# Altium footprint library FootPrintLib_12.PcbLib: 319 footprints (part 18 of 20)
Each footprint in its own frame and in the unit in brackets; x right, y up, seen from the top. Pads: shape width x height; smd on the part's side, far side on the other; paste and mask are expansions set on the pad; w line width, h text height; cw(c..) or ccw(c..) is an arc to the next point about the centre after c.
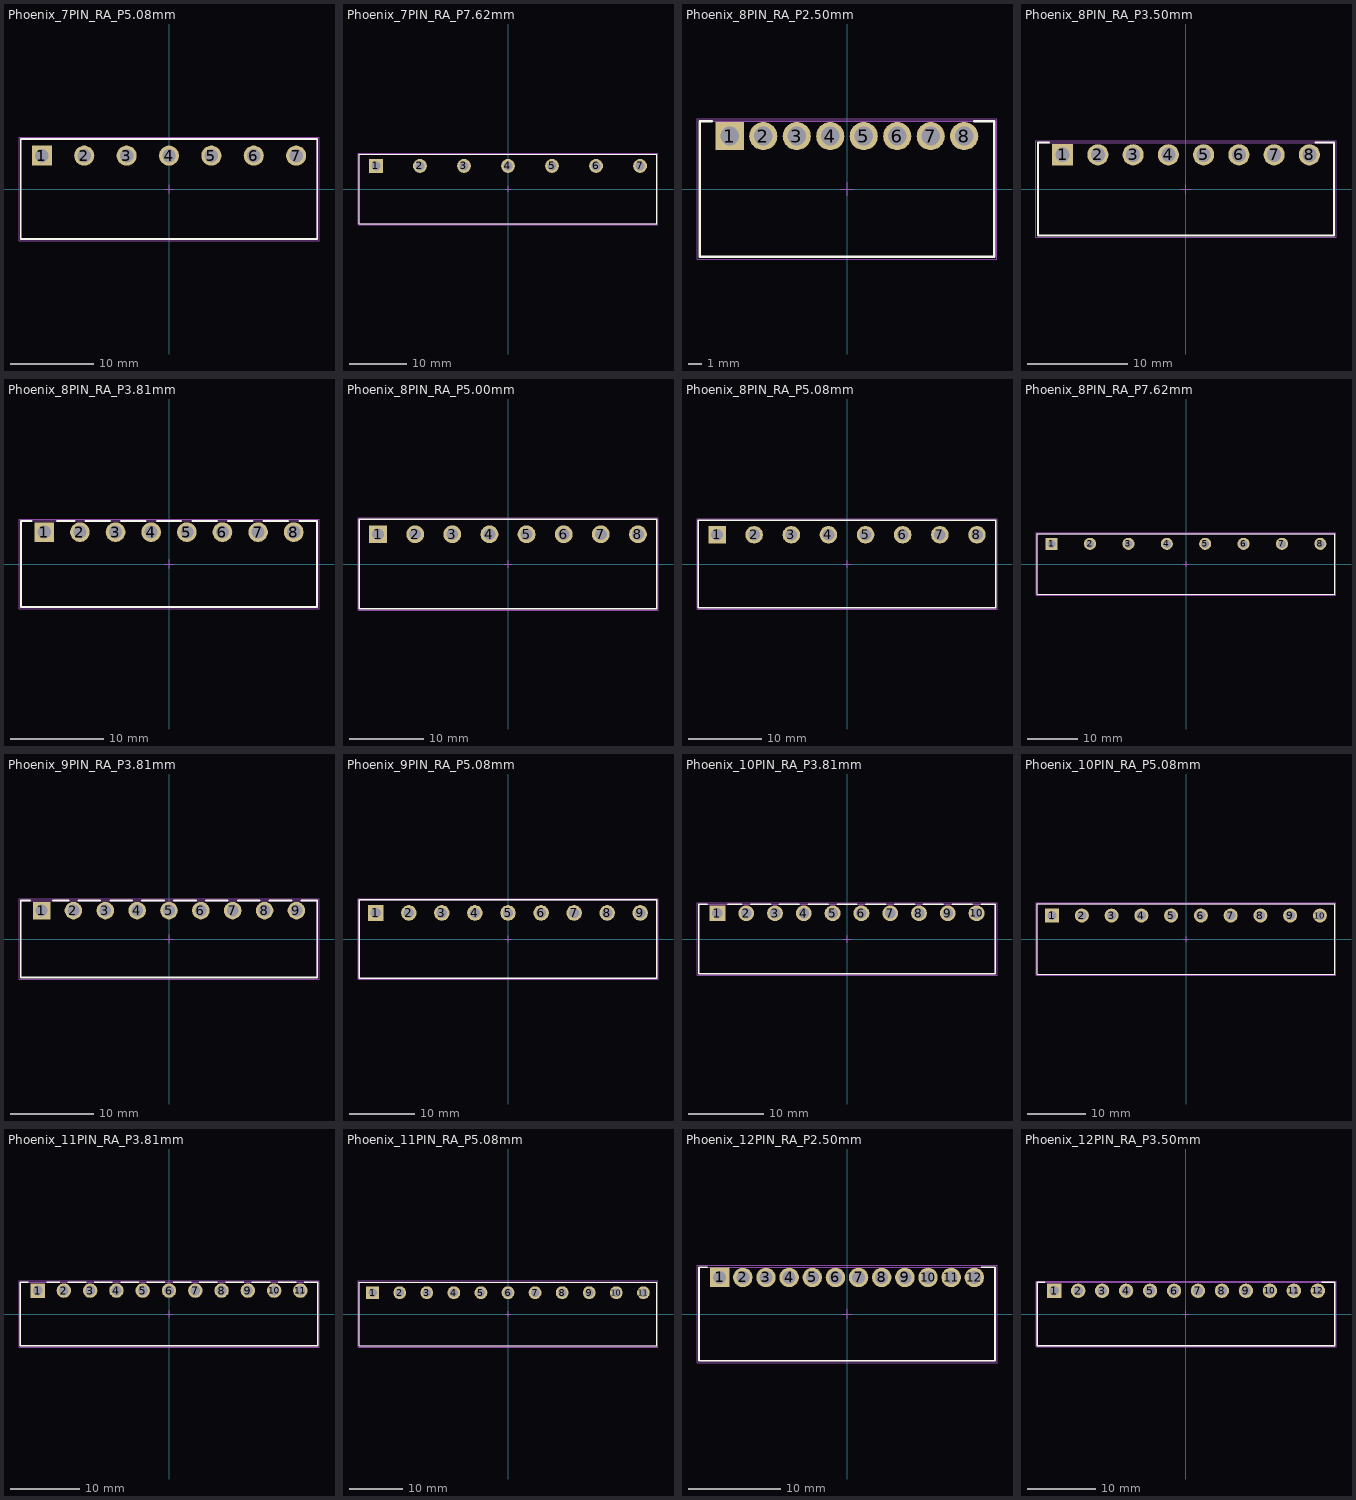
[diagram p17: the footprints below, top view; thin cyan lines are the x and y axes]

## Phoenix_7PIN_RA_P5.08mm [mm] "Phoenix 7 Pin; Pitch 5.08mm; Body 3556X1200"
height 8.5
pads (7):
  rect 2.4x2.4 hole 1.6: 1(-15.24,4)
  round 2.4 hole 1.6: 2(-10.16,4) 3(-5.08,4) 4(0,4) 5(5.08,4) 6(10.16,4) 7(15.24,4)
Top Overlay:
  lines w0.2: -17.78,-6 -17.78,6 17.78,6 17.78,-6 -17.78,-6
Mechanical 13:
  lines w0.1: -17.78,-6 17.78,-6 17.78,6 -17.78,6 -17.78,-6
Mechanical 15:
  lines w0.05: -0.5,0 0.5,0 ; 0,-0.5 0,0.5 ; -17.98,-6.2 -17.98,6.2 17.98,6.2 17.98,-6.2 -17.98,-6.2
3D body "691312510007.stp": height 8.55, standoff -3.45, extent -17.78,-6 17.78,6

## Phoenix_7PIN_RA_P7.62mm [mm] "Phoenix 7 Pin; Pitch 7.62mm;"
height 8.5
pads (7):
  rect 2.4x2.4 hole 1.6: 1(-22.86,4)
  round 2.4 hole 1.6: 2(-15.24,4) 3(-7.62,4) 4(0,4) 5(7.62,4) 6(15.24,4) 7(22.86,4)
Top Overlay:
  lines w0.2: -25.76,-6 25.76,-6 25.76,6 -25.76,6 -25.76,-6
Mechanical 13:
  lines w0.1: -25.76,-6 -25.76,6 25.76,6 25.76,-6 -25.76,-6
Mechanical 15:
  lines w0.05: -0.5,0 0.5,0 ; 0,-0.5 0,0.5 ; -25.96,-6.2 -25.96,6.2 25.96,6.2 25.96,-6.2 -25.96,-6.2
3D body "691312410007.stp": height 8.55, standoff -3.95, extent -25.76,-6 25.76,6

## Phoenix_8PIN_RA_P2.50mm [mm] "Phoenix 8 Pin; Pitch 2.50mm;"
height 8.1
pads (8):
  rect 2.1x2.1 hole 1.4: 1(-8.75,3.95)
  round 2.1 hole 1.4: 2(-6.25,3.95) 3(-3.75,3.95) 4(-1.25,3.95) 5(1.25,3.95) 6(3.75,3.95) 7(6.25,3.95) 8(8.75,3.95)
Top Overlay:
  lines w0.2: -10.1,5.05 -11,5.05 -11,-5.05 11,-5.05 11,5.05 9.5,5.05
Mechanical 13:
  lines w0.1: -11,-5.05 11,-5.05 11,5.05 -11,5.05 -11,-5.05
Mechanical 15:
  lines w0.05: -0.5,0 0.5,0 ; 0,-0.5 0,0.5 ; -11.2,-5.25 11.2,-5.25 11.2,5.25 -11.2,5.25 -11.2,-5.25
3D body "691382010008.stp": height 8.15, standoff -3.45, extent -11,-5.05 11,5.05

## Phoenix_8PIN_RA_P3.50mm [mm] "Phoenix 8 Pin; Pitch 3.50mm;"
height 7
pads (8):
  rect 2.1x2.1 hole 1.4: 1(-12.25,3.4)
  round 2.1 hole 1.4: 2(-8.75,3.4) 3(-5.25,3.4) 4(-1.75,3.4) 5(1.75,3.4) 6(5.25,3.4) 7(8.75,3.4) 8(12.25,3.4)
Top Overlay:
  lines w0.2: -13.6,4.6 -14.7,4.6 -14.7,-4.6 14.7,-4.6 14.7,4.6 12.85,4.6
Mechanical 13:
  lines w0.1: -14.7,-4.6 -14.7,4.6 14.7,4.6 14.7,-4.6 -14.7,-4.6
Mechanical 15:
  lines w0.05: -0.5,0 0.5,0 ; 0,-0.5 0,0.5 ; -14.9,-4.8 -14.9,4.8 14.9,4.8 14.9,-4.8 -14.9,-4.8
3D body "691322110008.stp": height 7.3, standoff -3.4, extent -14.7,-4.6 14.7,4.6

## Phoenix_8PIN_RA_P3.81mm [mm] "Phoenix 8 Pin; Pitch 3.81mm;"
height 7
pads (8):
  rect 2.1x2.1 hole 1.4: 1(-13.335,3.4)
  round 2.1 hole 1.4: 2(-9.525,3.4) 3(-5.715,3.4) 4(-1.905,3.4) 5(1.905,3.4) 6(5.715,3.4) 7(9.525,3.4) 8(13.335,3.4)
Top Overlay:
  lines w0.2: -14.685,4.6 -15.835,4.6 -15.835,-4.6 15.835,-4.6 15.835,4.6 13.925,4.6 ; -11.985,4.6 -10.115,4.6 ; -8.935,4.6 -6.305,4.6 ; -5.125,4.6 -2.495,4.6 ; -1.315,4.6 1.315,4.6 ; 2.495,4.6 5.125,4.6 ; 6.305,4.6 8.935,4.6 ; 10.115,4.6 12.745,4.6
Mechanical 13:
  lines w0.1: -15.835,-4.6 -15.835,4.6 15.835,4.6 15.835,-4.6 -15.835,-4.6
Mechanical 15:
  lines w0.05: -0.5,0 0.5,0 ; 0,-0.5 0,0.5 ; -16.035,-4.8 -16.035,4.8 16.035,4.8 16.035,-4.8 -16.035,-4.8
3D body "691322310008.stp": height 7.25, standoff -3.45, extent -15.835,-4.6 15.835,4.6

## Phoenix_8PIN_RA_P5.00mm [mm] "Phoenix 8 Pin; Pitch 5.08mm;"
height 8.5
pads (8):
  rect 2.4x2.4 hole 1.6: 1(-17.5,4)
  round 2.4 hole 1.6: 2(-12.5,4) 3(-7.5,4) 4(-2.5,4) 5(2.5,4) 6(7.5,4) 7(12.5,4) 8(17.5,4)
Top Overlay:
  lines w0.2: -20,-6 -20,6 20,6 20,-6 -20,-6
Mechanical 13:
  lines w0.1: -20,-6 20,-6 20,6 -20,6 -20,-6
Mechanical 15:
  lines w0.05: -0.5,0 0.5,0 ; 0,-0.5 0,0.5 ; -20.2,-6.2 -20.2,6.2 20.2,6.2 20.2,-6.2 -20.2,-6.2
3D body "691312710008.stp": height 8.55, standoff -3.45, extent -20,-6 20,6

## Phoenix_8PIN_RA_P5.08mm [mm] "Phoenix 8 Pin; Pitch 5.08mm; Body 4064X1200"
height 8.5
pads (8):
  rect 2.4x2.4 hole 1.6: 1(-17.78,4)
  round 2.4 hole 1.6: 2(-12.7,4) 3(-7.62,4) 4(-2.54,4) 5(2.54,4) 6(7.62,4) 7(12.7,4) 8(17.78,4)
Top Overlay:
  lines w0.2: -20.32,-6 -20.32,6 20.32,6 20.32,-6 -20.32,-6
Mechanical 13:
  lines w0.1: -20.32,-6 20.32,-6 20.32,6 -20.32,6 -20.32,-6
Mechanical 15:
  lines w0.05: -0.5,0 0.5,0 ; 0,-0.5 0,0.5 ; -20.52,-6.2 -20.52,6.2 20.52,6.2 20.52,-6.2 -20.52,-6.2
3D body "691312510008.stp": height 8.55, standoff -3.45, extent -20.32,-6 20.32,6

## Phoenix_8PIN_RA_P7.62mm [mm] "Phoenix 8 Pin; Pitch 7.62mm;"
height 8.5
pads (8):
  rect 2.4x2.4 hole 1.6: 1(-26.67,4)
  round 2.4 hole 1.6: 2(-19.05,4) 3(-11.43,4) 4(-3.81,4) 5(3.81,4) 6(11.43,4) 7(19.05,4) 8(26.67,4)
Top Overlay:
  lines w0.2: -29.57,-6 29.57,-6 29.57,6 -29.57,6 -29.57,-6
Mechanical 13:
  lines w0.1: -29.57,-6 -29.57,6 29.57,6 29.57,-6 -29.57,-6
Mechanical 15:
  lines w0.05: -0.5,0 0.5,0 ; 0,-0.5 0,0.5 ; -29.77,-6.2 -29.77,6.2 29.77,6.2 29.77,-6.2 -29.77,-6.2
3D body "691312410008.stp": height 8.55, standoff -3.95, extent -29.57,-6 29.57,6

## Phoenix_9PIN_RA_P3.81mm [mm] "Phoenix 9 Pin; Pitch 3.81mm;"
height 7
pads (9):
  rect 2.1x2.1 hole 1.4: 1(-15.24,3.4)
  round 2.1 hole 1.4: 2(-11.43,3.4) 3(-7.62,3.4) 4(-3.81,3.4) 5(0,3.4) 6(3.81,3.4) 7(7.62,3.4) 8(11.43,3.4) 9(15.24,3.4)
Top Overlay:
  lines w0.2: -16.59,4.6 -17.74,4.6 -17.74,-4.6 17.74,-4.6 17.74,4.6 15.83,4.6 ; -13.89,4.6 -12.02,4.6 ; -10.84,4.6 -8.21,4.6 ; -7.03,4.6 -4.4,4.6 ; -3.22,4.6 -0.59,4.6 ; 0.59,4.6 3.22,4.6 ; 4.4,4.6 7.03,4.6 ; 8.21,4.6 10.84,4.6 ; 12.02,4.6 14.65,4.6
Mechanical 13:
  lines w0.1: -17.74,-4.6 -17.74,4.6 17.74,4.6 17.74,-4.6 -17.74,-4.6
Mechanical 15:
  lines w0.05: -0.5,0 0.5,0 ; 0,-0.5 0,0.5 ; -17.94,-4.8 -17.94,4.8 17.94,4.8 17.94,-4.8 -17.94,-4.8
3D body "691322310009.stp": height 7.25, standoff -3.45, extent -17.74,-4.6 17.74,4.6

## Phoenix_9PIN_RA_P5.08mm [mm] "Phoenix 9 Pin; Pitch 5.08mm; Body 4572X1200"
height 8.5
pads (9):
  rect 2.4x2.4 hole 1.6: 1(-20.32,4)
  round 2.4 hole 1.6: 2(-15.24,4) 3(-10.16,4) 4(-5.08,4) 5(0,4) 6(5.08,4) 7(10.16,4) 8(15.24,4) 9(20.32,4)
Top Overlay:
  lines w0.2: -22.86,-6 -22.86,6 22.86,6 22.86,-6 -22.86,-6
Mechanical 13:
  lines w0.1: -22.86,-6 22.86,-6 22.86,6 -22.86,6 -22.86,-6
Mechanical 15:
  lines w0.05: -0.5,0 0.5,0 ; 0,-0.5 0,0.5 ; -23.06,-6.2 -23.06,6.2 23.06,6.2 23.06,-6.2 -23.06,-6.2
3D body "691312510009.stp": height 8.55, standoff -3.45, extent -22.86,-6 22.86,6

## Phoenix_10PIN_RA_P3.81mm [mm] "Phoenix 10 Pin; Pitch 3.81mm;"
height 7
pads (10):
  rect 2.1x2.1 hole 1.4: 1(-17.145,3.4)
  round 2.1 hole 1.4: 2(-13.335,3.4) 3(-9.525,3.4) 4(-5.715,3.4) 5(-1.905,3.4) 6(1.905,3.4) 7(5.715,3.4) 8(9.525,3.4) 9(13.335,3.4) 10(17.145,3.4)
Top Overlay:
  lines w0.2: -18.495,4.6 -19.645,4.6 -19.645,-4.6 19.645,-4.6 19.645,4.6 17.735,4.6 ; -15.795,4.6 -13.925,4.6 ; -12.745,4.6 -10.115,4.6 ; -8.935,4.6 -6.305,4.6 ; -5.125,4.6 -2.495,4.6 ; -1.315,4.6 1.315,4.6 ; 2.495,4.6 5.125,4.6 ; 6.305,4.6 8.935,4.6 ; 10.115,4.6 12.745,4.6 ; 13.925,4.6 16.555,4.6
Mechanical 13:
  lines w0.1: -19.645,-4.6 19.645,-4.6 19.645,4.6 -19.645,4.6 -19.645,-4.6
Mechanical 15:
  lines w0.05: -0.5,0 0.5,0 ; 0,-0.5 0,0.5 ; -19.845,-4.8 19.845,-4.8 19.845,4.8 -19.845,4.8 -19.845,-4.8
3D body "691322310010.stp": height 7.25, standoff -3.45, extent -19.645,-4.6 19.645,4.6

## Phoenix_10PIN_RA_P5.08mm [mm] "Phoenix 10 Pin; Pitch 5.08mm; Body 5080X1200"
height 8.5
pads (10):
  rect 2.4x2.4 hole 1.6: 1(-22.86,4)
  round 2.4 hole 1.6: 2(-17.78,4) 3(-12.7,4) 4(-7.62,4) 5(-2.54,4) 6(2.54,4) 7(7.62,4) 8(12.7,4) 9(17.78,4) 10(22.86,4)
Top Overlay:
  lines w0.2: -25.4,-6 25.4,-6 25.4,6 -25.4,6 -25.4,-6
Mechanical 13:
  lines w0.1: -25.4,-6 -25.4,6 25.4,6 25.4,-6 -25.4,-6
Mechanical 15:
  lines w0.05: -0.5,0 0.5,0 ; 0,-0.5 0,0.5 ; -25.6,-6.2 25.6,-6.2 25.6,6.2 -25.6,6.2 -25.6,-6.2
3D body "691312510010.stp": height 8.55, standoff -3.45, extent -25.4,-6 25.4,6

## Phoenix_11PIN_RA_P3.81mm [mm] "Phoenix 11 Pin; Pitch 3.81mm;"
height 7
pads (11):
  rect 2.1x2.1 hole 1.4: 1(-19.05,3.4)
  round 2.1 hole 1.4: 2(-15.24,3.4) 3(-11.43,3.4) 4(-7.62,3.4) 5(-3.81,3.4) 6(0,3.4) 7(3.81,3.4) 8(7.62,3.4) 9(11.43,3.4) 10(15.24,3.4) 11(19.05,3.4)
Top Overlay:
  lines w0.2: -20.4,4.6 -21.55,4.6 -21.55,-4.6 21.55,-4.6 21.55,4.6 19.64,4.6 ; -17.7,4.6 -15.83,4.6 ; -14.65,4.6 -12.02,4.6 ; -10.84,4.6 -8.21,4.6 ; -7.03,4.6 -4.4,4.6 ; -3.22,4.6 -0.59,4.6 ; 0.59,4.6 3.22,4.6 ; 4.4,4.6 7.03,4.6 ; 8.21,4.6 10.84,4.6 ; 12.02,4.6 14.65,4.6 ; 15.83,4.6 18.46,4.6
Mechanical 13:
  lines w0.1: -21.55,-4.6 -21.55,4.6 21.55,4.6 21.55,-4.6 -21.55,-4.6
Mechanical 15:
  lines w0.05: -0.5,0 0.5,0 ; 0,-0.5 0,0.5 ; -21.75,-4.8 -21.75,4.8 21.75,4.8 21.75,-4.8 -21.75,-4.8
3D body "691322310011.stp": height 7.25, standoff -3.45, extent -21.55,-4.6 21.55,4.6

## Phoenix_11PIN_RA_P5.08mm [mm] "Phoenix 11 Pin; Pitch 5.08mm; Body 5588X1200"
height 8.5
pads (11):
  rect 2.4x2.4 hole 1.6: 1(-25.4,4)
  round 2.4 hole 1.6: 2(-20.32,4) 3(-15.24,4) 4(-10.16,4) 5(-5.08,4) 6(0,4) 7(5.08,4) 8(10.16,4) 9(15.24,4) 10(20.32,4) 11(25.4,4)
Top Overlay:
  lines w0.2: -27.94,-6 27.94,-6 27.94,6 -27.94,6 -27.94,-6
Mechanical 13:
  lines w0.1: -27.94,-6 -27.94,6 27.94,6 27.94,-6 -27.94,-6
Mechanical 15:
  lines w0.05: -0.5,0 0.5,0 ; 0,-0.5 0,0.5 ; -28.14,-6.2 28.14,-6.2 28.14,6.2 -28.14,6.2 -28.14,-6.2
3D body "691312510011.stp": height 8.55, standoff -3.45, extent -27.94,-6 27.94,6

## Phoenix_12PIN_RA_P2.50mm [mm] "Phoenix 12 Pin; Pitch 2.50mm;"
height 8.1
pads (12):
  rect 2.1x2.1 hole 1.4: 1(-13.75,3.95)
  round 2.1 hole 1.4: 2(-11.25,3.95) 3(-8.75,3.95) 4(-6.25,3.95) 5(-3.75,3.95) 6(-1.25,3.95) 7(1.25,3.95) 8(3.75,3.95) 9(6.25,3.95) 10(8.75,3.95) 11(11.25,3.95) 12(13.75,3.95)
Top Overlay:
  lines w0.2: -15.1,5.05 -16,5.05 -16,-5.05 16,-5.05 16,5.05 14.5,5.05
Mechanical 13:
  lines w0.1: -16,-5.05 -16,5.05 16,5.05 16,-5.05 -16,-5.05
Mechanical 15:
  lines w0.05: -0.5,0 0.5,0 ; 0,-0.5 0,0.5 ; -16.2,-5.25 -16.2,5.25 16.2,5.25 16.2,-5.25 -16.2,-5.25
3D body "691382010012.stp": height 8.15, standoff -3.45, extent -16,-5.05 16,5.05

## Phoenix_12PIN_RA_P3.50mm [mm] "Phoenix 12 Pin; Pitch 3.50mm;"
height 7
pads (12):
  rect 2.1x2.1 hole 1.4: 1(-19.25,3.4)
  round 2.1 hole 1.4: 2(-15.75,3.4) 3(-12.25,3.4) 4(-8.75,3.4) 5(-5.25,3.4) 6(-1.75,3.4) 7(1.75,3.4) 8(5.25,3.4) 9(8.75,3.4) 10(12.25,3.4) 11(15.75,3.4) 12(19.25,3.4)
Top Overlay:
  lines w0.2: -20.6,4.6 -21.7,4.6 -21.7,-4.6 21.7,-4.6 21.7,4.6 19.85,4.6
Mechanical 13:
  lines w0.1: -21.7,-4.6 21.7,-4.6 21.7,4.6 -21.7,4.6 -21.7,-4.6
Mechanical 15:
  lines w0.05: -0.5,0 0.5,0 ; 0,-0.5 0,0.5 ; -21.9,-4.8 21.9,-4.8 21.9,4.8 -21.9,4.8 -21.9,-4.8
3D body "691322110012.stp": height 7.3, standoff -3.4, extent -21.7,-4.6 21.7,4.6